# Altium footprint library SmartClimate_BOM.PcbLib: 29 footprints (part 1 of 2)
Each footprint in its own frame and in the unit in brackets; x right, y up, seen from the top. Pads: shape width x height; smd on the part's side, far side on the other; paste and mask are expansions set on the pad; w line width, h text height; cw(c..) or ccw(c..) is an arc to the next point about the centre after c.
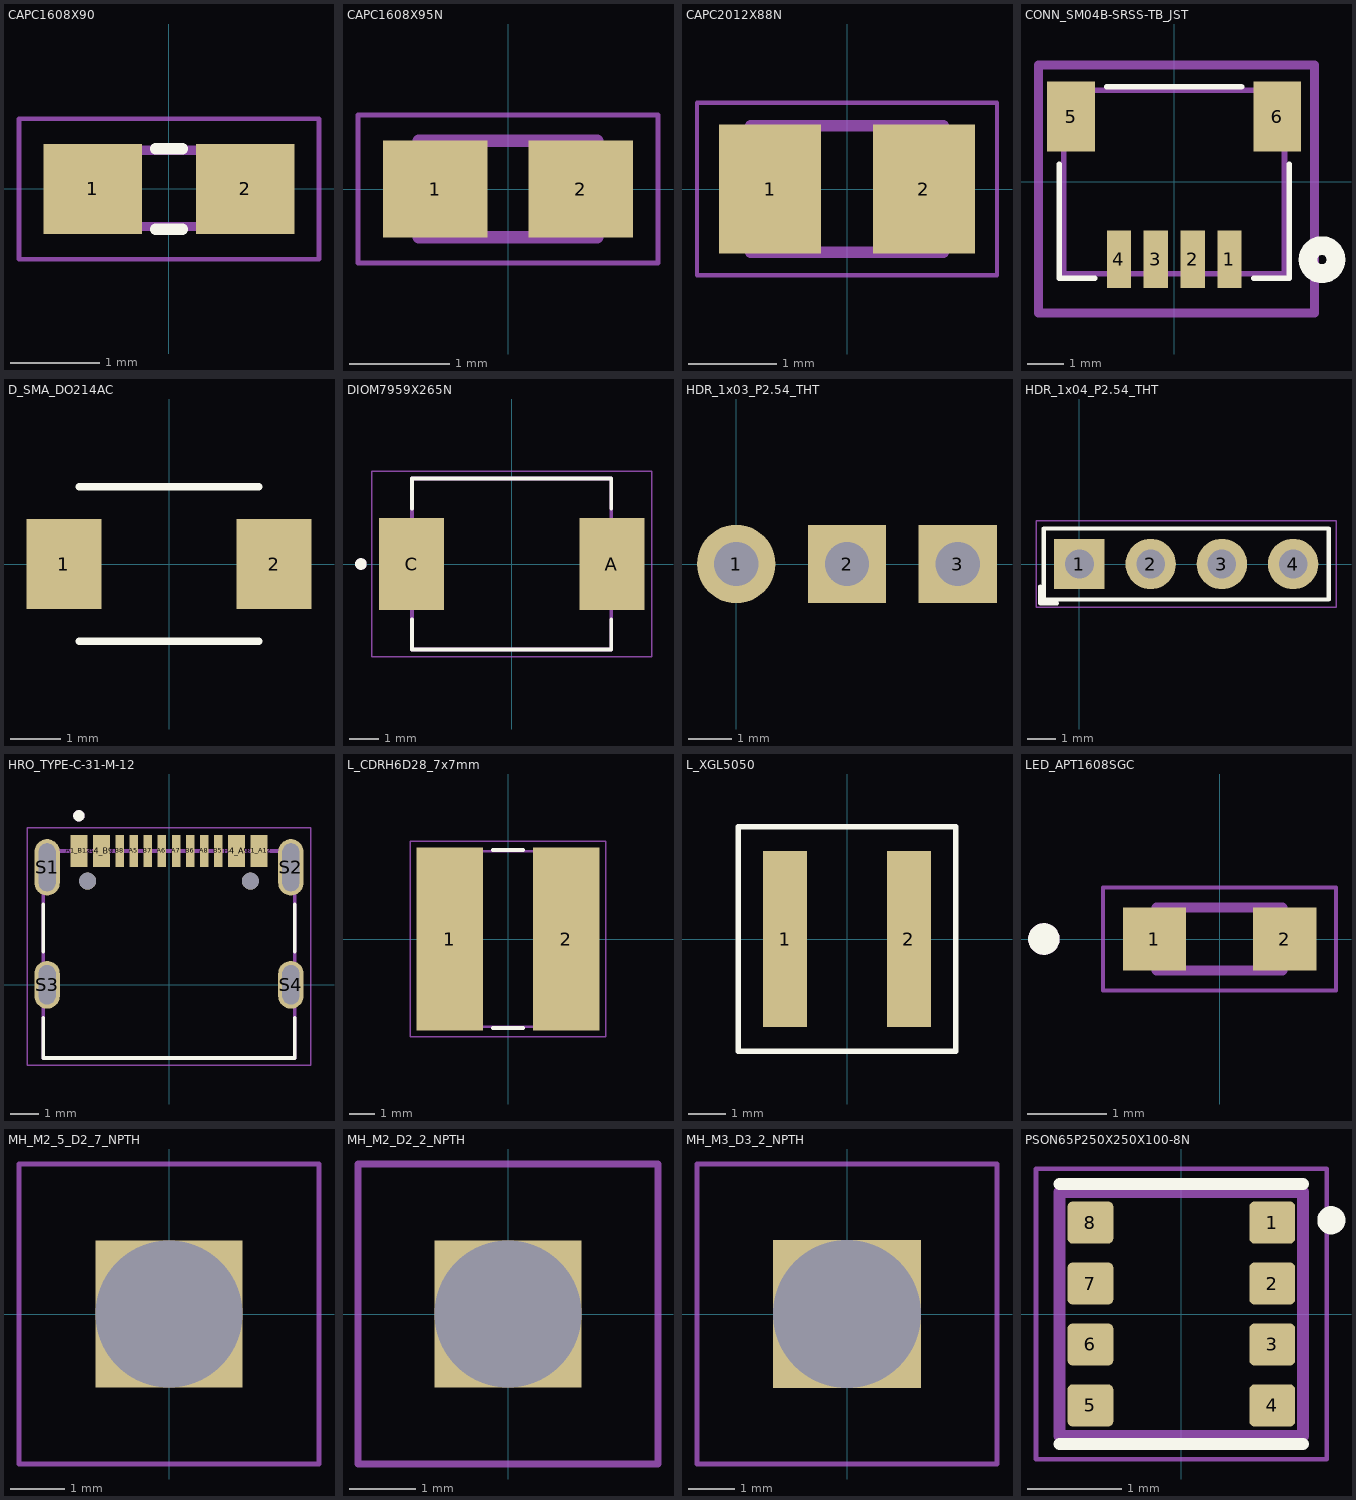
[diagram p0: the footprints below, top view; thin cyan lines are the x and y axes]

## CAPC1608X90 [mm]
pads (2):
  rect 1.1x1 smd: 1(-0.85,0) 2(0.85,0)
Top Overlay:
  lines w0.127: -0.15,-0.45 0.15,-0.45 ; -0.15,0.45 0.15,0.45
Mechanical 13:
  region: -0.338,-0.47 -0.839,-0.47 -0.839,0.48 -0.338,0.48
  region: 0.83,-0.471 0.331,-0.471 0.331,0.48 0.83,0.48
  lines w0.102: -0.356,-0.419 0.356,-0.419 ; -0.356,0.432 0.356,0.432
Mechanical 15:
  lines w0.051: -1.673,-0.783 1.673,-0.783 1.673,0.783 -1.673,0.783 -1.673,-0.783
3D body "step_temp.STEP": height 0.9, standoff 0, extent -0.8,-0.4 0.8,0.4

## CAPC1608X95N [mm]
pads (2):
  rect 1.04x0.97 smd paste+0 mask+0.102: 1(-0.726,0) 2(0.726,0)
Mechanical 13:
  lines w0.127: -0.89,-0.48 0.89,-0.48 0.89,0.48 -0.89,0.48 -0.89,-0.48
Mechanical 15:
  lines w0.05: -1.494,-0.735 1.494,-0.735 1.494,0.735 -1.494,0.735 -1.494,-0.735
3D body "step_temp.STEP": height 0.95, standoff 0, extent -0.8,-0.4 0.8,0.4

## CAPC2012X88N [mm]
pads (2):
  rect 1.16x1.47 smd: 1(-0.875,0) 2(0.875,0)
Mechanical 13:
  lines w0.127: -1.1,-0.72 -1.1,0.72 1.1,0.72 1.1,-0.72 -1.1,-0.72
Mechanical 15:
  lines w0.05: -1.708,-0.983 -1.708,0.983 1.708,0.983 1.708,-0.983 -1.708,-0.983
3D body "step_temp.STEP": height 1.4, standoff 0, extent -1.016,-0.635 1.016,0.635

## CONN_SM04B-SRSS-TB_JST [mil]
pads (6):
  rect 26x61 smd: 1(59.06,-82.62) 2(19.68,-82.62) 3(-19.68,-82.62) 4(-59.06,-82.62)
  rect 51x75 smd: 5(-110.24,69.94) 6(110.24,69.94)
Top Overlay:
  lines w6: -123,19 -123,-103 -85,-103 ; -72,102 72,102 ; 85,-103 123,-103 123,19
  lines w20: 143,-83 ccw(c158,-83) 173,-83 ccw(c158,-83) 143,-83
Bottom Overlay:
  lines w20: 133,-83 ccw(c148,-83) 163,-83 ccw(c148,-83) 133,-83
Top Assembly:
  lines w6: -118,-98 118,-98 118,98 -118,98 -118,-98
Top Courtyard:
  lines w10: -145,-140 150,-140 150,125 -145,125 -145,-140
3D body "step_temp.STEP": height 116.65, standoff 0.11, extent -118.11,-96.51 118.11,98.35

## D_SMA_DO214AC [mm] "SMA DO-214AC generic; pad 1 cathode; verify manufacturer land pattern"
height 2.3
pads (2):
  rect 1.5x1.8 smd paste+0 mask+0.05: 1(-2.1,0) 2(2.1,0)
Top Overlay:
  lines w0.15: -1.8,-1.55 1.8,-1.55 ; -1.8,1.55 1.8,1.55
3D body: height 2.29, standoff 0.15, extent -2.15,-1.3 2.15,1.3
3D body: height 2.3, standoff 2.29, extent -1.825,-1.3 -1.475,1.3
3D body: height 0.25, standoff 0, extent -2.65,-0.8 -2.05,0.8
3D body: height 0.25, standoff 0, extent 2.05,-0.8 2.65,0.8

## DIOM7959X265N [mm]
height 2.65
pads (2):
  rect 2.25x3.18 smd paste+0 mask+0.102: A(3.455,0) C(-3.455,0)
Top Overlay:
  circle w0.2: c-5.2,0 r0.1
  lines w0.127: -3.437,-1.91 -3.437,-2.95 3.437,-2.95 3.437,-1.91 ; -3.437,1.91 -3.437,2.95 3.437,2.95 3.437,1.91
Mechanical 13:
  circle w0.2: c-5.2,0 r0.1
  lines w0.127: -3.437,-2.95 -3.437,2.95 3.437,2.95 3.437,-2.95 -3.437,-2.95
Mechanical 15:
  lines w0.05: -4.83,-3.2 4.83,-3.2 4.83,3.2 -4.83,3.2 -4.83,-3.2
3D body "step_temp.STEP": height 2.58, standoff 0.38, extent -3.906,-2.873 3.994,2.927

## HDR_1x03_P2.54_THT [mm] "1x3 P2.54mm; 1.02mm plated holes; 1.8mm pads"
height 8.38
pads (3):
  round 1.8 hole 1.02: 1(0,0)
  rect 1.8x1.8 hole 1.02: 2(2.54,0) 3(5.08,0)
3D body: height 2.54, standoff 0, extent -1.27,-1.27 6.35,1.27
3D body: height 8.38, standoff -3.05, extent -0.32,-0.32 0.32,0.32
3D body: height 8.38, standoff -3.05, extent 2.22,-0.32 2.86,0.32
3D body: height 8.38, standoff -3.05, extent 4.76,-0.32 5.4,0.32

## HDR_1x04_P2.54_THT [mm] "Samtec TSW 1x4 vertical header, 2.54mm pitch; 1.02mm plated holes, 1.8mm lands; square pad 1"
height 8.38
pads (4):
  rect 1.8x1.8 hole 1.02: 1(0,0)
  round 1.8 hole 1.02: 2(2.54,0) 3(5.08,0) 4(7.62,0)
Top Overlay:
  lines w0.15: -1.4,-0.8 -1.4,-1.4 -0.8,-1.4 ; -1.27,-1.27 -1.27,1.27 8.89,1.27 8.89,-1.27 -1.27,-1.27
Bottom Assembly:
  lines w0.1: -1.27,-1.27 -1.27,1.27 8.89,1.27 8.89,-1.27 -1.27,-1.27
Bottom 3D Body:
  lines w0.05: -1.55,-1.55 -1.55,1.55 9.15,1.55 9.15,-1.55 -1.55,-1.55
3D body: height 2.54, standoff 0, extent -1.27,-1.27 8.89,1.27

## HRO_TYPE-C-31-M-12 [mm]
height 3.26
pads (18):
  rect 0.6x1.14 smd mask+0.05: A1_B12(-3.2,4.75) A4_B9(-2.4,4.75) B1_A12(3.2,4.75) B4_A9(2.4,4.75)
  rect 0.3x1.14 smd mask+0.05: A5(-1.25,4.75) A6(-0.25,4.75) A7(0.25,4.75) A8(1.25,4.75) B5(1.75,4.75) B6(0.75,4.75) B7(-0.75,4.75) B8(-1.75,4.75)
  oval 0.9x2 hole 0.6 slot 1.7 at 90 deg: S1(-4.325,4.17) S2(4.325,4.17)
  oval 0.9x1.7 hole 0.6 slot 1.4 at 90 deg: S3(-4.325,0) S4(4.325,0)
  round 0.6 hole 0.6 unplated: ""(-2.89,3.68) ""(2.89,3.68)
Top Overlay:
  circle w0.2: c-3.2,6 r0.1
  lines w0.127: -4.47,-1.17 -4.47,-2.6 4.47,-2.6 4.47,-1.17 ; -4.47,1.17 -4.47,2.85 ; 4.47,1.17 4.47,2.85
Top Assembly:
  circle w0.2: c-3.2,6 r0.1
  lines w0.127: -4.47,-2.6 -4.47,4.75 4.47,4.75 4.47,-2.6 -4.47,-2.6
Top Courtyard:
  lines w0.05: -5.025,-2.85 5.025,-2.85 5.025,5.57 -5.025,5.57 -5.025,-2.85
3D body "step_temp.STEP": height 3.31, standoff -0.99, extent -4.47,-2.6 4.47,5.305

## L_CDRH6D28_7x7mm [mm] "Sumida CDRH6D28, body 7x7x3mm maximum; 2.65x7.3mm lands, 2mm gap"
height 3
pads (2):
  rect 2.65x7.3 smd paste+0 mask+0.05: 1(-2.325,0) 2(2.325,0)
Top Overlay:
  lines w0.15: -0.6,-3.55 0.6,-3.55 ; -0.6,3.55 0.6,3.55
Bottom Assembly:
  lines w0.1: -3.5,-3.5 -3.5,3.5 3.5,3.5 3.5,-3.5 -3.5,-3.5
Bottom 3D Body:
  lines w0.05: -3.9,-3.9 -3.9,3.9 3.9,3.9 3.9,-3.9 -3.9,-3.9
3D body: height 0.2, standoff 0, extent 1,-3.1 3.5,3.1
3D body: height 0.2, standoff 0, extent -3.5,-3.1 -1,3.1
3D body: height 3, standoff 2.85, extent -2.7,-2.7 2.7,2.7
3D body: height 2.85, standoff 0.12, extent -3.5,-3.5 3.5,3.5

## L_XGL5050 [mm] "Coilcraft XGL5050 recommended land pattern; 3.31mm pad centers, 1.18x4.7mm pads"
height 5.1
pads (2):
  rect 1.18x4.7 smd paste+0 mask+0.05: 1(-1.655,0) 2(1.655,0)
Top Overlay:
  lines w0.15: -2.9,-3 2.9,-3 2.9,3 -2.9,3 -2.9,-3
3D body: height 5.1, standoff 0.1, extent -2.64,-2.74 2.64,2.74
3D body: height 0.15, standoff 0, extent -2.245,-2.35 -1.065,2.35
3D body: height 0.15, standoff 0, extent 1.065,-2.35 2.245,2.35

## LED_APT1608SGC [mm]
height 0.75
pads (2):
  rect 0.8x0.8 smd: 1(-0.825,0) 2(0.825,0)
Top Overlay:
  circle w0.2: c-2.225,0 r0.1
Mechanical 13:
  circle w0.2: c-2.225,0 r0.1
  lines w0.127: -0.8,-0.4 -0.8,0.4 0.8,0.4 0.8,-0.4 -0.8,-0.4
Mechanical 15:
  lines w0.05: -1.475,-0.65 1.475,-0.65 1.475,0.65 -1.475,0.65 -1.475,-0.65
3D body "step_temp.STEP": height 0.75, standoff 0, extent -0.8,-0.4 0.8,0.4

## MH_M2_5_D2_7_NPTH [mm] "M2.5 mounting hole; drill 2.7mm NPTH; no copper annulus; 5.5mm screw-head envelope on Mechanical 15"
pads (1):
  rect 2.7x2.7 hole 2.7 unplated: ""(0,0)
Mechanical 15:
  lines w0.1: -2.75,-2.75 2.75,-2.75 2.75,2.75 -2.75,2.75 -2.75,-2.75

## MH_M2_D2_2_NPTH [mm] "M2 mounting hole; drill 2.2mm NPTH; no copper annulus; 4.5mm screw-head envelope on Mechanical 15"
pads (1):
  rect 2.2x2.2 hole 2.2 unplated: ""(0,0)
Mechanical 15:
  lines w0.1: -2.25,-2.25 2.25,-2.25 2.25,2.25 -2.25,2.25 -2.25,-2.25

## MH_M3_D3_2_NPTH [mm] "M3 mounting hole; drill 3.2mm NPTH; no copper annulus; 6.5mm screw-head envelope on Mechanical 15"
pads (1):
  rect 3.2x3.2 hole 3.2 unplated: ""(0,0)
Mechanical 15:
  lines w0.1: -3.25,-3.25 3.25,-3.25 3.25,3.25 -3.25,3.25 -3.25,-3.25

## PSON65P250X250X100-8N [mm]
pads (8):
  rrect25% 0.49x0.45 smd paste+0 mask+0.102: 1(0.97,0.975) 2(0.97,0.325) 3(0.97,-0.325) 4(0.97,-0.975) 5(-0.97,-0.975) 6(-0.97,-0.325) 7(-0.97,0.325) 8(-0.97,0.975)
Top Overlay:
  circle w0.2: c1.6,1 r0.05
  lines w0.127: -1.3,-1.385 1.3,-1.385 ; -1.3,1.385 1.3,1.385
Mechanical 13:
  circle w0.2: c1,1 r0.05
  lines w0.127: -1.3,-1.3 1.3,-1.3 1.3,1.3 -1.3,1.3 -1.3,-1.3
Mechanical 15:
  lines w0.05: -1.55,-1.55 -1.55,1.55 1.55,1.55 1.55,-1.55 -1.55,-1.55
3D body "step_temp.STEP": height 1, standoff 0, extent -1.25,-1.25 1.25,1.25